# Altium footprint library Tester_componete_PCB.PcbLib: 21 footprints (part 1 of 2)
Each footprint in its own frame and in the unit in brackets; x right, y up, seen from the top. Pads: shape width x height; smd on the part's side, far side on the other; paste and mask are expansions set on the pad; w line width, h text height; cw(c..) or ccw(c..) is an arc to the next point about the centre after c.
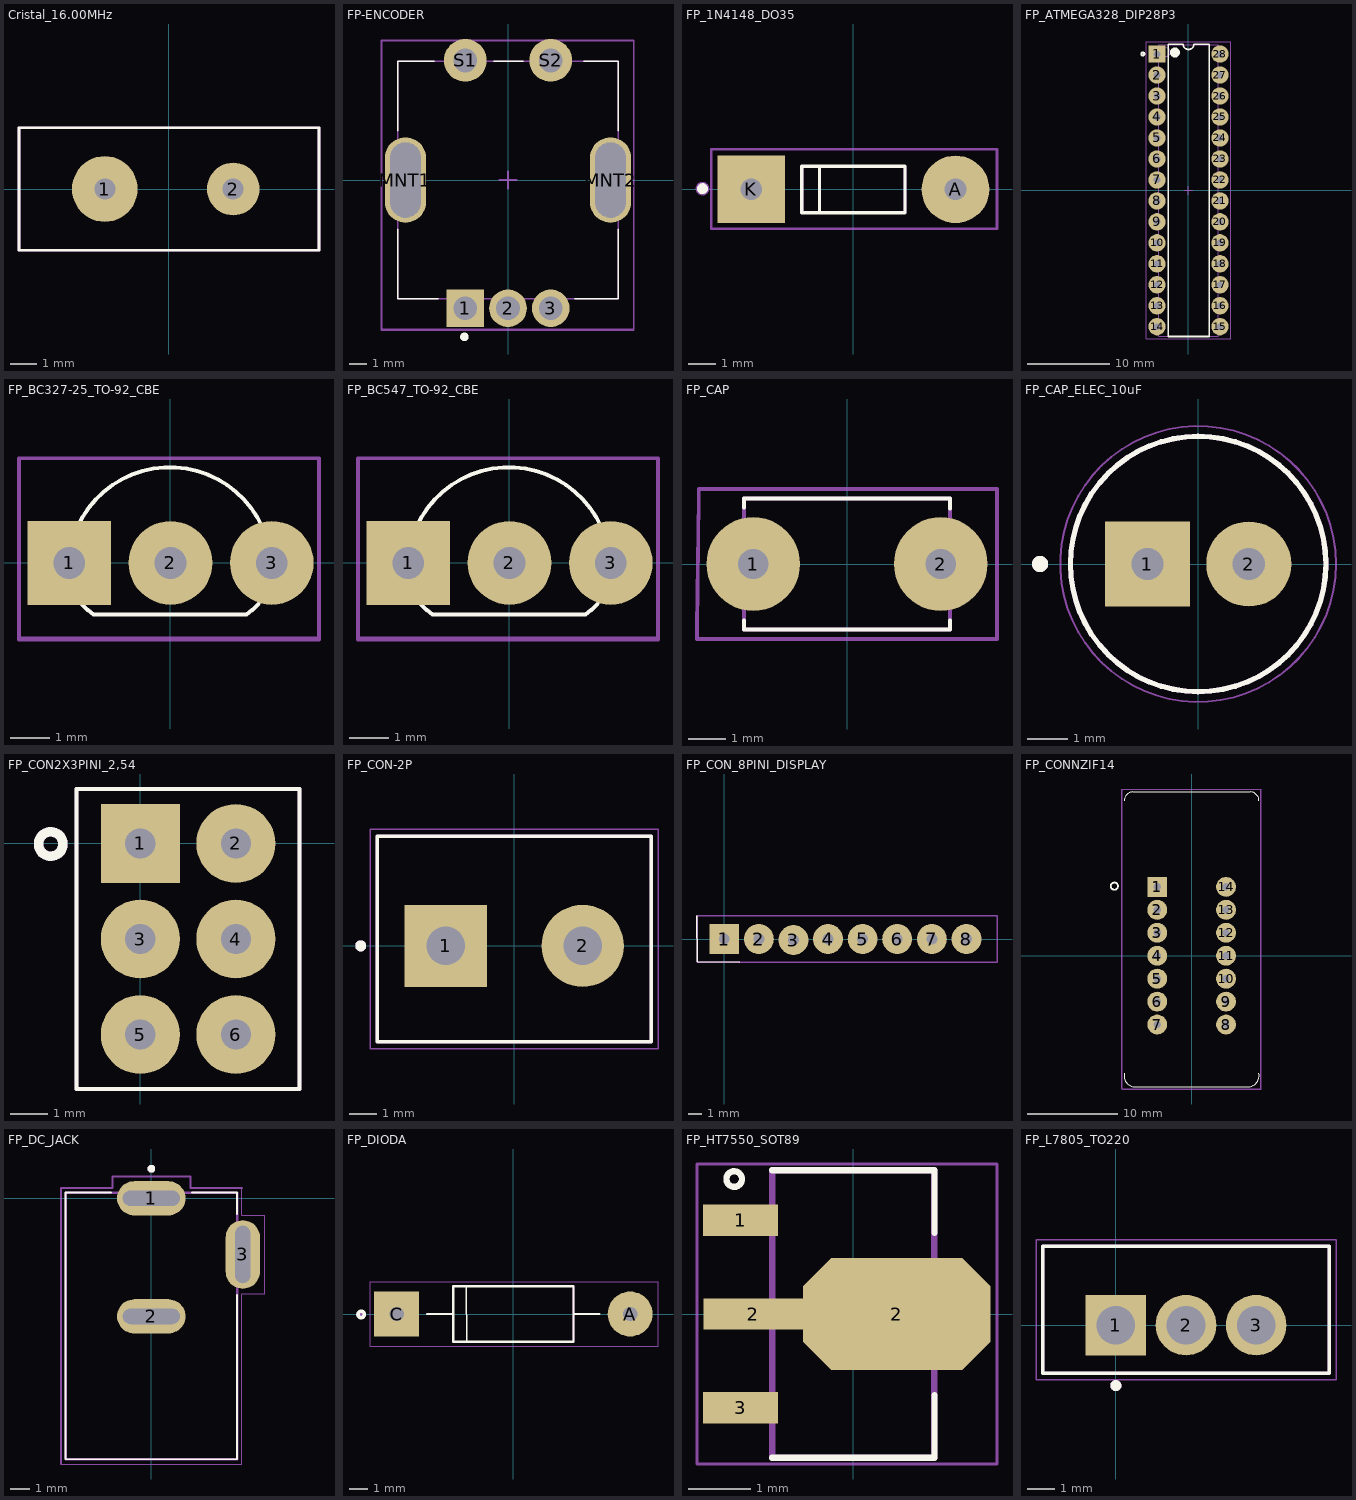
[diagram p0: the footprints below, top view; thin cyan lines are the x and y axes]

## Cristal_16.00MHz [mm] "Cristal;16MHz;THT;20pF;±30ppm;±5ppm/an;1mW;4,88mm / Producator: YIC; Simbol producator: 16.00M-HC49-S; Conformitate / RoHS"
pads (2):
  round 2.5 hole 0.8 mask+0.1: 1(-2.44,0)
  round 2 hole 0.8 mask+0.1: 2(2.44,0)
Top Overlay:
  lines w0.1: -5.7,-2.325 5.7,-2.325 5.7,2.325 -5.7,2.325 -5.7,-2.325
Assembly:
  lines w0.1: -5.7,-2.325 5.7,-2.325 5.7,2.325 -5.7,2.325 -5.7,-2.325
Courtyard:
  lines w0.1: -5.7,-2.325 5.7,-2.325 5.7,2.325 -5.7,2.325 -5.7,-2.325

## FP-ENCODER [mm]
pads (7):
  rect 2.2x2.2 hole 1.4 paste-2539.97 mask+0.1: 1(-2.5,-7.5)
  round 2.2 hole 1.4 paste-2539.97 mask+0.1: 2(0,-7.5) 3(2.5,-7.5)
  rrect100% 2.4x5 hole 4.4 slot 1.8 at 0 deg paste-2539.97 mask+0: MNT1(-6,0) MNT2(6,0)
  round 2.5 hole 1.4 paste-2539.97 mask+0.1: S1(-2.5,7) S2(2.5,7)
Top Overlay:
  circle w0.25: c-2.55,-9.175 r0.125
  lines w0.1: -6.45,-2.875 -6.45,-6.95 -4.075,-6.95 ; -6.45,2.875 -6.45,6.95 -4.325,6.95 ; -0.825,6.95 0.875,6.95 ; 3.925,-6.95 6.45,-6.95 6.45,-2.875 ; 4.425,6.95 6.45,6.95 6.45,2.875
Assembly:
  lines w0.1: -7.4,8.15 -7.4,-8.775 -3.713,-8.775 3.662,-8.775 7.35,-8.775 7.35,8.15 3.687,8.15 -3.688,8.15 -7.375,8.15
Top 3D Body:
  lines w0.1: -6.45,-6.95 -6.45,6.95 6.45,6.95 6.45,-6.95 -6.45,-6.95
Courtyard:
  lines w0.1: -7.4,-8.75 -3.712,-8.75 3.662,-8.75 7.35,-8.75 7.35,8.175 3.662,8.175 -3.712,8.175 -7.4,8.175 -7.4,-8.725
Top Component Center:
  lines w0.1: -0.5,0 0.5,0 ; 0,-0.5 0,0.5
3D body "Enc_Bourns_PEC11R-4220K-S0024_eec.STEP": height 27, standoff -3.7, extent -7.036,-7.65 7.036,7.15

## FP_1N4148_DO35 [mm]
height 1.91
pads (2):
  round 2.5 hole 0.8 mask+0.102: A(3.769,0)
  rect 2.5x2.5 / inner oval 2.5x2.2 / far side rect 2.2x2.2 hole 0.8 mask+0.102: K(-3.768,0)
Top Overlay:
  circle w0.2: c-5.575,0.025 r0.1
  lines w0.1: -1.25,-0.85 -1.25,0.825
  lines w0.127: -1.902,-0.86 -1.902,0.86 1.903,0.86 1.903,-0.86 -1.902,-0.86
Assembly:
  circle w0.1: c-5.575,0.025 r0.202
  lines w0.1: -1.902,-0.86 -1.902,0.85 1.903,0.85 1.903,-0.86 -1.902,-0.86
Courtyard:
  lines w0.1: -5.25,-1.45 5.3,-1.45 5.3,1.475 -5.25,1.475 -5.25,-1.45

## FP_ATMEGA328_DIP28P3 [mm] "28-Pin Plastic Dual In-Line Package (PDIP)"
height 4.58
pads (28):
  rect 2.1x2.1 hole 0.8: 1(-3.81,16.51)
  round 2.1 hole 0.8: 2(-3.81,13.97) 3(-3.81,11.43) 4(-3.81,8.89) 5(-3.81,6.35) 6(-3.81,3.81) 7(-3.81,1.27) 8(-3.81,-1.27) 9(-3.81,-3.81) 10(-3.81,-6.35) 11(-3.81,-8.89) 12(-3.81,-11.43) 13(-3.81,-13.97) 14(-3.81,-16.51) 15(3.81,-16.51) 16(3.81,-13.97) 17(3.81,-11.43) 18(3.81,-8.89) 19(3.81,-6.35) 20(3.81,-3.81) 21(3.81,-1.27) 22(3.81,1.27) 23(3.81,3.81) 24(3.81,6.35) 25(3.81,8.89) 26(3.81,11.43) 27(3.81,13.97) 28(3.81,16.51)
Top Overlay:
  circle w0.25: c-5.525,16.525 r0.177
  circle w0.6: c-1.65,16.7 r0.3
  lines w0.2: -2.45,-17.7 -2.45,17.7 -0.635,17.7 ccw(c0,17.7) 0.635,17.7 2.5,17.7 2.5,-17.7 -2.45,-17.7
Assembly:
  circle w0.1: c-2.7,16.75 r0.5
  lines w0.1: -3.6,-17.65 3.6,-17.65 3.6,17.65 -3.6,17.65 -3.6,-17.65
Courtyard:
  lines w0.1: -0.5,0 0.5,0 ; 0,-0.5 0,0.5 ; -5.1,-18 5.1,-18 5.1,18 -5.1,18 -5.1,-18
3D body: height 4.58, standoff 0, extent -3.6,-17.65 3.6,17.65

## FP_BC327-25_TO-92_CBE [mm]
pads (3):
  rect 2.1x2.1 hole 0.8: 1(-2.54,0)
  round 2.1 hole 0.8: 2(0,0) 3(2.54,0)
Top Overlay:
  lines w0.1: -2.342,-0.884 ccw(c-0.93,0.113) -1.925,-1.3 ; -2.335,0.9 cw(c-0.017,-0.14) 2.3,0.9 ; -1.9,-1.3 1.9,-1.3 ccw(c0.905,0.113) 2.317,-0.884
Assembly:
  lines w0.1: -3.8,-1.9 3.725,-1.9 3.725,2.625 -3.8,2.625 -3.8,-1.9
Courtyard:
  lines w0.1: -3.8,-1.925 3.725,-1.925 3.725,2.625 -3.8,2.625 -3.8,-1.925
3D body "p210_TO-92.stp": height 8.6, standoff -8.5, extent -2.74,-1.28 2.74,2.32

## FP_BC547_TO-92_CBE [mm]
pads (3):
  rect 2.1x2.1 hole 0.8: 1(-2.54,0)
  round 2.1 hole 0.8: 2(0,0) 3(2.54,0)
Top Overlay:
  lines w0.1: -2.342,-0.884 ccw(c-0.93,0.113) -1.925,-1.3 ; -2.335,0.9 cw(c-0.017,-0.14) 2.3,0.9 ; -1.9,-1.3 1.9,-1.3 ccw(c0.905,0.113) 2.317,-0.884
Assembly:
  lines w0.1: -3.8,-1.9 -3.8,2.625 3.725,2.625 3.725,-1.9 -3.8,-1.9
Courtyard:
  lines w0.1: -3.8,-1.925 -3.8,2.625 3.725,2.625 3.725,-1.925 -3.8,-1.925
3D body "p210_TO-92.stp": height 8.6, standoff -8.5, extent -2.74,-1.28 2.74,2.32

## FP_CAP [mm]
pads (2):
  round 2.5 hole 0.8: 1(-2.5,0) 2(2.5,0)
Top Overlay:
  lines w0.1: -2.75,-1.5 -2.75,-1.75 2.75,-1.75 2.75,-1.5 ; -2.75,1.5 -2.75,1.75 2.75,1.75 2.75,1.475
Assembly:
  lines w0.1: -2.75,-1.75 2.75,-1.75 2.75,1.75 -2.75,1.75 -2.75,-1.75
Courtyard:
  lines w0.1: -4,-2 4,-2 4,2 -3.95,2 -3.95,1.75 -4,-1.7 -4,-1.975
3D body "step_temp.STEP": height 6, standoff -9, extent -2.75,-1.75 2.75,1.75

## FP_CAP_ELEC_10uF [mm]
pads (2):
  rect 2.1x2.1 hole 0.8: 1(-1.25,0)
  round 2.1 hole 0.8: 2(1.25,0)
Top Overlay:
  circle w0.2: c-3.9,0 r0.1
  circle w0.127: c0,0 r3.15
Mechanical 13:
  circle w0.2: c-3.9,0 r0.1
  circle w0.127: c0,0 r3.15
Courtyard:
  circle w0.05: c0,0 r3.4
3D body "step_temp.STEP": height 11.2, standoff -17, extent -3.15,-3.149 3.15,3.149

## FP_CON2X3PINI_2,54 [mm]
pads (6):
  rect 2.1x2.1 hole 0.8 mask+0.05: 1(0,0)
  round 2.1 hole 0.8 mask+0.05: 2(2.54,0) 3(0,-2.54) 4(2.54,-2.54) 5(0,-5.08) 6(2.54,-5.08)
Top Overlay:
  circle w0.254: c-2.38,-0.015 r0.325
  lines w0.1: -1.692,-6.528 4.233,-6.528 4.233,1.448 -1.692,1.448 -1.692,-6.528
Assembly:
  circle w0.254: c-2.38,-0.015 r0.325
  lines w0.1: -1.692,-6.528 4.233,-6.528 4.233,1.448 -1.692,1.448 -1.692,-6.528
Courtyard:
  lines w0.1: -1.692,-6.528 4.233,-6.528 4.233,1.448 -1.692,1.448 -1.692,-6.528

## FP_CON-2P [mm]
height 10
pads (2):
  rect 3x3 / inner round 3 / far side rect 3x3 hole 1.4: 1(-2.5,0)
  round 3 hole 1.4: 2(2.5,0)
Top Overlay:
  circle w0.2: c-5.6,0 r0.1
  lines w0.127: -5,-3.5 -5,4 5,4 5,-3.5 -5,-3.5
Assembly:
  circle w0.2: c-5.6,0 r0.1
  lines w0.127: -5,-3.5 5,-3.5 5,4 -5,4 -5,-3.5
Courtyard:
  lines w0.05: -5.25,-3.75 5.25,-3.75 5.25,4.25 -5.25,4.25 -5.25,-3.75
3D body "step_temp.STEP": height 10, standoff -4.5, extent -5.675,-3.325 4.925,4.175

## FP_CON_8PINI_DISPLAY [mm]
pads (8):
  rect 2.2x2.2 hole 0.8 mask+0.05: 1(0,0)
  round 2.2 hole 0.8 mask+0.05: 2(2.54,0) 3(5.08,-0.075) 4(7.62,0) 5(10.16,0) 6(12.7,0) 7(15.24,0) 8(17.78,0)
Top Overlay:
  lines w0.1: -2,1.7 -1.975,-1.675 1.125,-1.7
Assembly:
  lines w0.1: -1.975,-1.7 20.025,-1.7 20.025,1.7 -1.975,1.7 -1.975,-1.7
Courtyard:
  lines w0.1: -1.975,-1.7 20.025,-1.7 20.025,1.7 -1.975,1.7 -1.975,-1.7

## FP_CONNZIF14 [mm]
pads (14):
  rect 2.2x2.2 hole 0.8: 1(-3.81,7.62)
  round 2.2 hole 0.8: 2(-3.81,5.08) 3(-3.81,2.54) 4(-3.81,0) 5(-3.81,-2.54) 6(-3.81,-5.08) 7(-3.81,-7.62) 8(3.81,-7.62) 9(3.81,-5.08) 10(3.81,-2.54) 11(3.81,0) 12(3.81,2.54) 13(3.81,5.08) 14(3.81,7.62)
Top Overlay:
  circle w0.2: c-8.55,7.7 r0.4
  lines w0.1: -7.451,-13.006 ccw(c-6.235,-13.265) -6.494,-14.481 ; -7.45,17.165 cw(c-6.495,17.165) -6.495,18.12 ; -6.5,-14.48 6.5,-14.48 ; -6.5,18.12 6.5,18.12 ; 6.494,-14.481 ccw(c6.235,-13.265) 7.451,-13.006 ; 6.495,18.12 cw(c6.495,17.165) 7.45,17.165
Assembly:
  lines w0.05: -7.75,-14.7 7.65,-14.7 7.65,18.45 -7.75,18.45 -7.75,-14.7
Courtyard:
  lines w0.05: -7.7,-14.75 -7.7,18.4 7.7,18.4 7.7,-14.75 -7.7,-14.75

## FP_DC_JACK [mm]
height 11.5
pads (3):
  oval 3.6x1.8 hole 0.8 slot 3 at 0 deg mask+0.102: 1(0,0) 2(0,-6.2)
  oval 1.8x3.6 hole 0.8 slot 3 at 90 deg mask+0.102: 3(4.8,-2.95)
Top Overlay:
  circle w0.2: c0,1.55 r0.1
  lines w0.1: -2.12,0.3 -4.5,0.3 -4.5,-13.7 4.5,-13.7 4.5,-5.07 ; 2.12,0.3 4.5,0.3 4.5,-0.83
Assembly:
  circle w0.2: c0,1.55 r0.1
  lines w0.127: -4.5,-13.7 -4.5,0.3 4.5,0.3 4.5,-13.7 -4.5,-13.7
Courtyard:
  lines w0.05: -4.75,-13.95 4.75,-13.95 4.75,-5 5.95,-5 5.95,-0.9 4.75,-0.9 4.75,0.55
  lines w0.1: -4.75,-13.95 -4.75,0.55 -2.05,0.55 -2.05,1.15 2.05,1.15 2.05,0.55 4.75,0.55
3D body "step_temp.STEP": height 4.5, standoff -10.5, extent -4.85,-13.375 4.6,0.675

## FP_DIODA [mm]
height 3.6
pads (2):
  round 2.5 hole 0.8 mask+0.102: A(6.5,0)
  rect 2.5x2.5 / inner round 2.5 / far side rect 2.5x2.5 hole 0.8 mask+0.102: C(-6.5,0)
Top Overlay:
  circle w0.2: c-8.475,-0.025 r0.177
  lines w0.1: -4.8,0 -3.35,0 ; -3.35,1.55 3.35,1.55 ; -2.625,1.5 -2.6,-1.55 ; 3.35,0 4.775,0
  lines w0.127: -4.8,0 -3.35,0 ; 4.775,0 3.35,0 ; -3.35,0 -3.35,-1.55 3.35,-1.55 3.35,0 ; -3.35,0 -3.35,1.55 3.35,1.55 3.35,0
Assembly:
  circle w0.2: c-8.45,0 r0.1
  lines w0.1: -3.35,1.55 -3.35,0 -3.35,-1.55 3.35,-1.55 3.35,0 3.35,1.55
Courtyard:
  lines w0.05: -7.975,-1.8 8.05,-1.8 8.05,-0.9 8.05,0.9 8.05,1.8 -7.975,1.8 -7.975,-1.8
3D body "step_temp.STEP": height 3.6, standoff -17.1, extent -6.9,-1.8 6.9,1.8

## FP_HT7550_SOT89 [mm] "SOT89, 3-Leads, Body 4.5x2.4 mm, Pitch 1.5mm, Lead Span 4.1mm, IPC High Density"
height 1.61
pads (4):
  rect 1.2x0.5 smd mask+0.05: 1(-1.8,1.5) 3(-1.8,-1.5)
  rect 1.6x0.5 smd mask+0.05: 2(-1.6,0)
  oct 3x1.8 smd mask+0.05: 2(0.7,0)
Top Overlay:
  circle w0.1: c-1.905,2.159 r0.125
  lines w0.1: -1.3,-2.3 1.3,-2.3 1.3,-1.3 ; -1.3,2.3 1.3,2.3 1.3,1.3
Assembly:
  lines w0.1: -1.295,-2.3 -1.295,2.3 1.295,2.3 1.295,-2.3 -1.295,-2.3
Courtyard:
  lines w0.05: -2.5,-2.4 -2.5,2.4 2.3,2.4 2.3,-2.4 -2.5,-2.4
  lines w0.1: -0.5,0 0.5,0 ; 0,-0.5 0,0.5
3D body: height 1.6, standoff 0, extent -1.295,-2.3 1.295,2.3

## FP_L7805_TO220 [mm]
pads (3):
  rect 2.2x2.2 / inner round 2.2 / far side rect 2.2x2.2 hole 1.4: 1(0,0)
  round 2.2 hole 1.4: 2(2.55,0) 3(5.1,0)
Top Overlay:
  circle w0.2: c0,-2.195 r0.1
  lines w0.127: -2.65,-1.74 -2.65,2.86 7.75,2.86 7.75,-1.74 -2.65,-1.74
Mechanical 13:
  circle w0.2: c0,-2.195 r0.1
  lines w0.127: -2.65,-1.74 -2.65,2.86 7.75,2.86 7.75,-1.74 -2.65,-1.74
Courtyard:
  lines w0.05: -2.9,-1.99 -2.9,3.106 8,3.106 8,-1.99 -2.9,-1.99
3D body "step_temp.STEP": height 19.68, standoff -9.22, extent -2.54,-1.742 7.66,2.758